# Altium schematic symbol library LT8362EMSEPBF.SchLib: 1 symbol
Pins are listed as number, name and electrical type; pins without a type are passive.

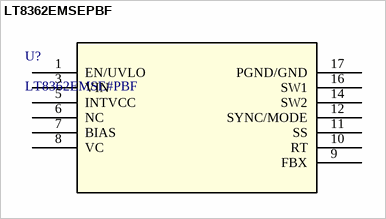
[diagram p0: symbol LT8362EMSEPBF]

## LT8362EMSEPBF
designator U?, comment LT8362EMSE#PBF
Low IQ Boost/SEPIC/Inverting Converter with 2A, 60V Switch; Manufacturer_Name: Analog Devices Inc; Copyright: Copyright (C) 2026 Ultra Librarian. All rights reserved.; Manufacturer_Part_Number: LT8362EMSE#PBF; Datasheet: https://www.analog.com/media/en/technical-documentation/data-sheets/lt8362.pdf; RefDes: RefDes; Type: Type
footprint MSE_16A_ADI
pins: 1 EN/UVLO, 3 VIN, 5 INTVCC, 6 NC, 7 BIAS, 8 VC, 9 FBX, 10 RT, 11 SS, 12 SYNC/MODE, 14 SW2, 16 SW1, 17 PGND/GND